# Altium schematic symbol library N_MOSFET.SchLib: 9 symbols
Pins are listed as number, name and electrical type; pins without a type are passive.

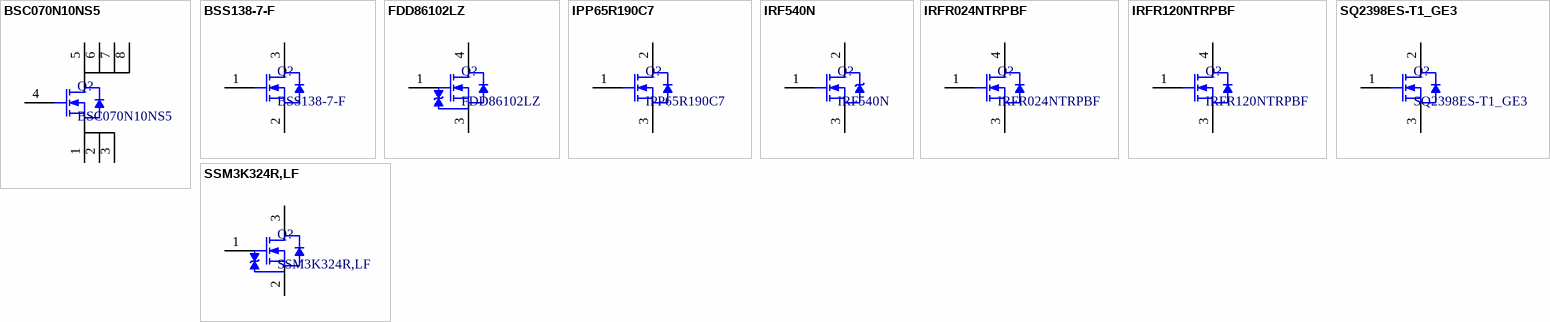
[diagram p0: symbols BSC070N10NS5 to SSM3K324R,LF]

## BSC070N10NS5
designator Q?
MOSFETs N-Ch 100V 90A TDSON-8; Manufacturer: Infineon Technologies; Continuous Drain Current: 80 A; Drain-to-Source On-Resistance: 7 mOhms; FET Type: N-Channel; Gate Threshold Voltage (Vth): 2.2 V; Gate-to-Source Voltage (VGS): ±20V; Power Dissipation: 83 W; Total Gate Charge: 30 nC; ComponentLink1Description: Datasheet; ComponentLink1URL: https://www.lcsc.com/datasheet/C534364.pdf?spm=wm.fly.bg.6.pdf___wm.fly.tp.2.ml&lcsc_vid=FQMKBABWTgUIBQJQFFEMBgBUFFIPVlNeFQReAQVWFFgxVlNeQlBfXldUQllWVzsOAxUeFF5JWBYZEEoKFBINSQcJGk4NBhADEA4cHktXQ1JbSQwSGg0%3D; Drain to Source Voltage (Vdss): 100 V; LCSC Part #: C534364; Manufacturer Part Number: BSC070N10NS5; Mount: SMD/SMT; Operating Temperature Max: + 150 C; Operating Temperature Min: - 55 C; Package / Case: TDSON-8; Packaging: Tape and Reel; Supplier 1 Part Number: 726-BSC070N10NS5ATMA; Supplier 1 URL: https://www.mouser.com/en/ProductDetail/Infineon-Technologies/BSC070N10NS5ATMA1?qs=3Bi3m9r5MQYNTOsczKwccQ%3D%3D&srsltid=AfmBOooib_klGS7x806dv1N0ZNZhSDo_7no9ucfa_klWF5Hcm8-_-cJe; Supplier 1: Mouser; Supplier 2 Part Number: BSC070N10NS5ATMA1TR-ND; Supplier 2 URL: https://www.digikey.com/en/products/detail/infineon-technologies/BSC070N10NS5ATMA1/5413654; Supplier 2: Digi-Key; Supplier 3 Part Number: N/A; Supplier 3 URL: N/A; Supplier 3: thegioiic; Value: BSC070N10NS5
footprint BSC070N10NS5
pins: 1 S, 2 S, 3 S, 4 G, 5 D, 6 D, 7 D, 8 D

## BSS138-7-F
designator Q?
MOSFETs 300mW 50V DSS; Manufacturer: Diodes Incorporated; Continuous Drain Current: 200 mA; Drain-to-Source On-Resistance: 3.5 Ohms; FET Type: N-Channel; Gate-to-Source Voltage (VGS): ±20V; Gate Threshold Voltage (Vth): 1.2 V; Drain to Source Voltage (Vdss): 50 V; Power Dissipation: 300 mW; Total Gate Charge: N/A; ComponentLink1Description: Datasheet; ComponentLink1URL: https://www.mouser.com/datasheet/2/115/ds30144-3214779.pdf; Supplier 1 URL: https://www.mouser.com/ProductDetail/Diodes-Incorporated/BSS138-7-F?qs=TJSU9qitBVRAP5gIAnNy0g%3D%3D; Supplier 2 URL: https://www.digikey.com/en/products/detail/diodes-incorporated/BSS138-7-F/717723; Supplier 3 URL: N/A; Value: BSS138-7-F; Manufacturer Part Number: BSS138-7-F; Mount: SMD/SMT; Operating Temperature Max: + 150 C; Operating Temperature Min: - 50 C; Package / Case: SOT-23-3; Packaging: Tape and Reel; Supplier 1: Mouser; Supplier 1 Part Number: 621-BSS138-7-F; Supplier 2: Digi-Key; Supplier 2 Part Number: BSS138-FDITR-ND; Supplier 3: thegioiic; Supplier 3 Part Number: N/A; LCSC Part #: C40912
footprint BSS138-7-F-SOT23 (SOT23, 3-Leads, Body 2.90x2.40mm, Pitch 0.90mm, IPC Medium Density)
pins: 1 G, 2 S, 3 D

## FDD86102LZ
designator Q?
MOSFETs 100V 22.5mΩ@10V,8A 3V@250uA 1 N-Channel TO-252(DPAK) MOSFETs ROHS; Manufacturer: onsemi; Continuous Drain Current: 42 A; Drain-to-Source On-Resistance: 31 mOhms; Gate-to-Source Voltage (VGS): ±20V; Gate Threshold Voltage (Vth): 1 V; Power Dissipation: 54 W; Total Gate Charge: 26 nC; Drain to Source Voltage (Vdss): 100 V; FET Type: N-Channel; ComponentLink1Description: Datasheet; ComponentLink1URL: https://www.mouser.com/datasheet/2/308/1/FDD86102LZ_D-2312405.pdf; Supplier 1 URL: https://www.mouser.com/ProductDetail/onsemi-Fairchild/FDD86102LZ?qs=dIxESgyDOriq9LDJtrMcmg%3D%3D; Supplier 2 URL: https://www.digikey.com/en/products/detail/onsemi/fdd86102lz/2602557; Supplier 3 URL: N/A; Value: FDD86102LZ; Manufacturer Part Number: FDD86102LZ; Mount: SMD/SMT; Operating Temperature Max: + 150 C; Operating Temperature Min: - 55 C; Package / Case: DPAK-3 (TO-252-3); Packaging: Tape and Reel; Supplier 1: Mouser; Supplier 1 Part Number: 512-FDD86102LZ; Supplier 2: Digi-Key; Supplier 2 Part Number: FDD86102LZFSTR-ND; Supplier 3: thegioiic; Supplier 3 Part Number: N/A; LCSC Part #: C111627
footprint TO-252-3 (D-PAK, 3-Pads, Body 6.20x6.54mm (max), IPC Medium Density)
pins: 1 G, 3 S, 4 D

## IPP65R190C7
designator Q?
MOSFET N-CH, 650V, 13A, 190mOhm, TO220AB; Manufacturer: Infineon Technologies; Drain-to-Source On-Resistance: 190 mOhms; FET Type: N-Channel; Gate-to-Source Voltage (VGS): ±20V; Gate Threshold Voltage (Vth): 3-4V; Power Dissipation: 72W; Total Gate Charge: 23nC; Continuous Drain Current: 13A; Drain to Source Voltage (Vdss): 650V; ComponentLink1Description: Datasheet; ComponentLink1URL: https://www.mouser.vn/datasheet/2/196/Infineon_IPP65R190C7_DS_v02_01_en-3165368.pdf; Supplier 1 URL: https://www.mouser.vn/ProductDetail/Infineon-Technologies/IPP65R190C7?qs=61g%252BPyeGH22xCcDq3bqxig%3D%3D; Supplier 2 URL: https://www.digikey.com/en/products/detail/rochester-electronics-llc/IPP65R190C7/13437818; Supplier 3 URL: N/A; Value: IPP65R190C7; Manufacturer Part Number: IPP65R190C7; Mount: SMD/SMT; Operating Temperature Max: + 85 C; Operating Temperature Min: - 40 C; Package / Case: TO-220AB; Packaging: Tape and Reel; Supplier 1: Mouser; Supplier 1 Part Number: 726-IPP65R190C7; Supplier 2: Digi-Key; Supplier 2 Part Number: 2156-IPP65R190C7-ND; Supplier 3: thegioiic; Supplier 3 Part Number: N/A; LCSC Part #: N/A
footprint IPP65R-TO-220AB
pins: 1 G, 2 D, 3 S

## IRF540N
designator Q?
MOSFET MOSFT 100V 33A 44mOhm 47.3nC; Manufacturer: Infineon Technologies; Gate Threshold Voltage (Vth): 2-4V; Gate-to-Source Voltage (VGS): ±20V; Total Gate Charge: 71nC; Power Dissipation: 130W; FET Type: N-Channel; Drain-to-Source On-Resistance: 44mΩ; Drain to Source Voltage (Vdss): 100V; Continuous Drain Current: 33A; ComponentLink1Description: Datasheet; ComponentLink1URL: https://www.mouser.vn/datasheet/2/196/Infineon_IRF540N_DataSheet_v01_01_EN-3166033.pdf; Supplier 1 URL: https://www.mouser.vn/ProductDetail/Infineon-Technologies/IRF540NPBF?qs=9%252BKlkBgLFf36us%252Bg5kwffA%3D%3D; Supplier 2 URL: https://www.digikey.com/en/products/detail/infineon-technologies/IRF540NPBF/811869; Supplier 3 URL: https://www.thegioiic.com/irf540npbf-mosfet-kenh-n-100v-33a-to-220ab; Value: IRF540N; Manufacturer Part Number: IRF540N; Mount: SMD/SMT; Operating Temperature Max: + 85 C; Operating Temperature Min: - 40 C; Package / Case: TO-220AB; Packaging: Tape and Reel; Supplier 1: Mouser; Supplier 1 Part Number: 942-IRF540NPBF; Supplier 2: Digi-Key; Supplier 2 Part Number: IRF540NPBF-ND; Supplier 3: thegioiic; Supplier 3 Part Number: N/A; LCSC Part #: N/A
footprint IRF540N-TO-220AB
pins: 1 G, 2 D, 3 S

## IRFR024NTRPBF
designator Q?
55V 17A 45W 75mΩ@10V,10A 2V 1 N-channel TO-252-2(DPAK) MOSFETs ROHS; Manufacturer: Infineon Technologies; Drain-to-Source On-Resistance: 75 mOhms; Gate-to-Source Voltage (VGS): ±20V; Gate Threshold Voltage (Vth): 1.8 V; Total Gate Charge: 20 nC; Continuous Drain Current: 17 A; Drain to Source Voltage (Vdss): 55 V; FET Type: N-Channel; Power Dissipation: 45 W; ComponentLink1Description: Datasheet; ComponentLink1URL: https://lcsc.com/datasheet/lcsc_datasheet_2409302232_Infineon-IRFR024NTRPBF_C2583.pdf; Supplier 1 URL: https://www.mouser.vn/ProductDetail/Infineon-Technologies/IRFR024NTRPBF?qs=9%252BKlkBgLFf35AlyEbDFeFQ%3D%3D; Supplier 2 URL: N/A; Supplier 3 URL: N/A; Value: IRFR024NTRPBF; Manufacturer Part Number: IRFR024NTRPBF; Mount: SMD/SMT; Operating Temperature Max: + 85 C; Operating Temperature Min: - 40 C; Package / Case: DPAK-3 (TO-252-3); Packaging: Tape and Reel; Supplier 1: Mouser; Supplier 1 Part Number: 942-IRFR024NTRPBF; Supplier 2: Digi-Key; Supplier 2 Part Number: N/A; Supplier 3: thegioiic; Supplier 3 Part Number: N/A; LCSC Part #: C2583
footprint TO-252-3 (D-PAK, 3-Pads, Body 6.20x6.54mm (max), IPC Medium Density)
pins: 1 G, 3 S, 4 D

## IRFR120NTRPBF
designator Q?
MOSFET 100V 1 N-CH HEXFET 210mOhms 16.7nC; Manufacturer: Infineon Technologies; Continuous Drain Current: 9.4 A; FET Type: N-Channel; Gate-to-Source Voltage (VGS): ±20V; Gate Threshold Voltage (Vth): 2.0 V; Power Dissipation: 48 W; Total Gate Charge: 23nC; Drain-to-Source On-Resistance: 210 mOhms; Drain to Source Voltage (Vdss): 100 V; ComponentLink1Description: Datasheet; ComponentLink1URL: https://www.mouser.vn/datasheet/2/196/Infineon_IRFR120N_DataSheet_v01_01_EN-3363096.pdf; Supplier 1 URL: https://www.mouser.com/ProductDetail/Toshiba/SSM3K324RLF?qs=PiFplXvYe5XQediraS9xUQ%3D%3D; Supplier 2 URL: N/A; Supplier 3 URL: N/A; Value: IRFR120NTRPBF; Manufacturer Part Number: IRFR120NTRPBF; Mount: SMD/SMT; Operating Temperature Max: + 85 C; Operating Temperature Min: - 40 C; Package / Case: DPAK-3 (TO-252-3); Packaging: Tape and Reel; Supplier 1: Mouser; Supplier 1 Part Number: 942-IRFR120NTRPBF; Supplier 2: Digi-Key; Supplier 2 Part Number: N/A; Supplier 3: thegioiic; Supplier 3 Part Number: N/A; LCSC Part #: C3008
footprint TO-252-3 (D-PAK, 3-Pads, Body 6.20x6.54mm (max), IPC Medium Density)
pins: 1 G, 3 S, 4 D

## SQ2398ES-T1_GE3
designator Q?
MOSFET N Ch 100Vds 20Vgs AEC-Q101 Qualified; Manufacturer: Vishay Semiconductors; Drain-to-Source On-Resistance: 300 mOhms; Continuous Drain Current: 1.6A; Drain to Source Voltage (Vdss): 100V; FET Type: N-Channel; Gate-to-Source Voltage (VGS): ±20V; Gate Threshold Voltage (Vth): 2.5-3.5V; Power Dissipation: 2W; Total Gate Charge: 3.4nC; ComponentLink1Description: Datasheet; ComponentLink1URL: https://www.vishay.com/doc?67117; Supplier 1 URL: https://www.mouser.vn/ProductDetail/Vishay-Semiconductors/SQ2398ES-T1_GE3?qs=Vcr9%2FL0R50iBTttjVcQTDw%3D%3D; Supplier 2 URL: https://www.digikey.com/en/products/detail/vishay-siliconix/SQ2398ES-T1-GE3/7566741?s=N4IgTCBcDaIMoEUwGYCcAOAonAtAFQEYB9AcU2RAF0BfIA; Supplier 3 URL: N/A; Value: SQ2398ES-T1_GE3; Manufacturer Part Number: SQ2398ES-T1_GE3; Mount: SMD/SMT; Operating Temperature Max: + 85 C; Operating Temperature Min: - 40 C; Package / Case: SOT-23; Packaging: Tape and Reel; Supplier 1: Mouser; Supplier 1 Part Number: 78-SQ2398ES-T1_GE3; Supplier 2: Digi-Key; Supplier 2 Part Number: SQ2398ES-T1_GE3TR-ND; Supplier 3: thegioiic; Supplier 3 Part Number: N/A; LCSC Part #: C727466
footprint SQ2398ES-SOT23
pins: 1 G, 2 D, 3 S

## SSM3K324R,LF
designator Q?
MOSFET N-Ch U-MOSVI FET ID 4A 30VDSS 200pF; Manufacturer: Toshiba; Drain-to-Source On-Resistance: 56 mOhms; Drain to Source Voltage (Vdss): 30 V; FET Type: N-Channel; Gate-to-Source Voltage (VGS): ±12V; Gate Threshold Voltage (Vth): 400 mV; Power Dissipation: 1W; Total Gate Charge: 23nC; Continuous Drain Current: 4 A; ComponentLink1Description: Datasheet; ComponentLink1URL: https://www.mouser.com/datasheet/2/408/SSM3K324R_datasheet_en_20210914-1916186.pdf; Supplier 1 URL: https://www.mouser.com/ProductDetail/Toshiba/SSM3K324RLF?qs=PiFplXvYe5XQediraS9xUQ%3D%3D; Supplier 2 URL: N/A; Supplier 3 URL: N/A; Value: SSM3K324R,LF; Manufacturer Part Number: SSM3K324R,LF; Mount: SMD/SMT; Operating Temperature Max: + 85 C; Operating Temperature Min: - 40 C; Package / Case: SOT-23F; Packaging: Tape and Reel; Supplier 1: Mouser; Supplier 1 Part Number: 757-SSM3K324RLF; Supplier 2: Digi-Key; Supplier 2 Part Number: N/A; Supplier 3: thegioiic; Supplier 3 Part Number: N/A; LCSC Part #: C395455
footprint SSM3K324R (SOTFL, 3-Leads, Body 2.90x2.40mm, Pitch 0.95mm, IPC Medium Density)
pins: 1 G, 2 S, 3 D